# Altium footprint library PcbLib1.PcbLib: 18 footprints (part 1 of 2)
Each footprint in its own frame and in the unit in brackets; x right, y up, seen from the top. Pads: shape width x height; smd on the part's side, far side on the other; paste and mask are expansions set on the pad; w line width, h text height; cw(c..) or ccw(c..) is an arc to the next point about the centre after c.
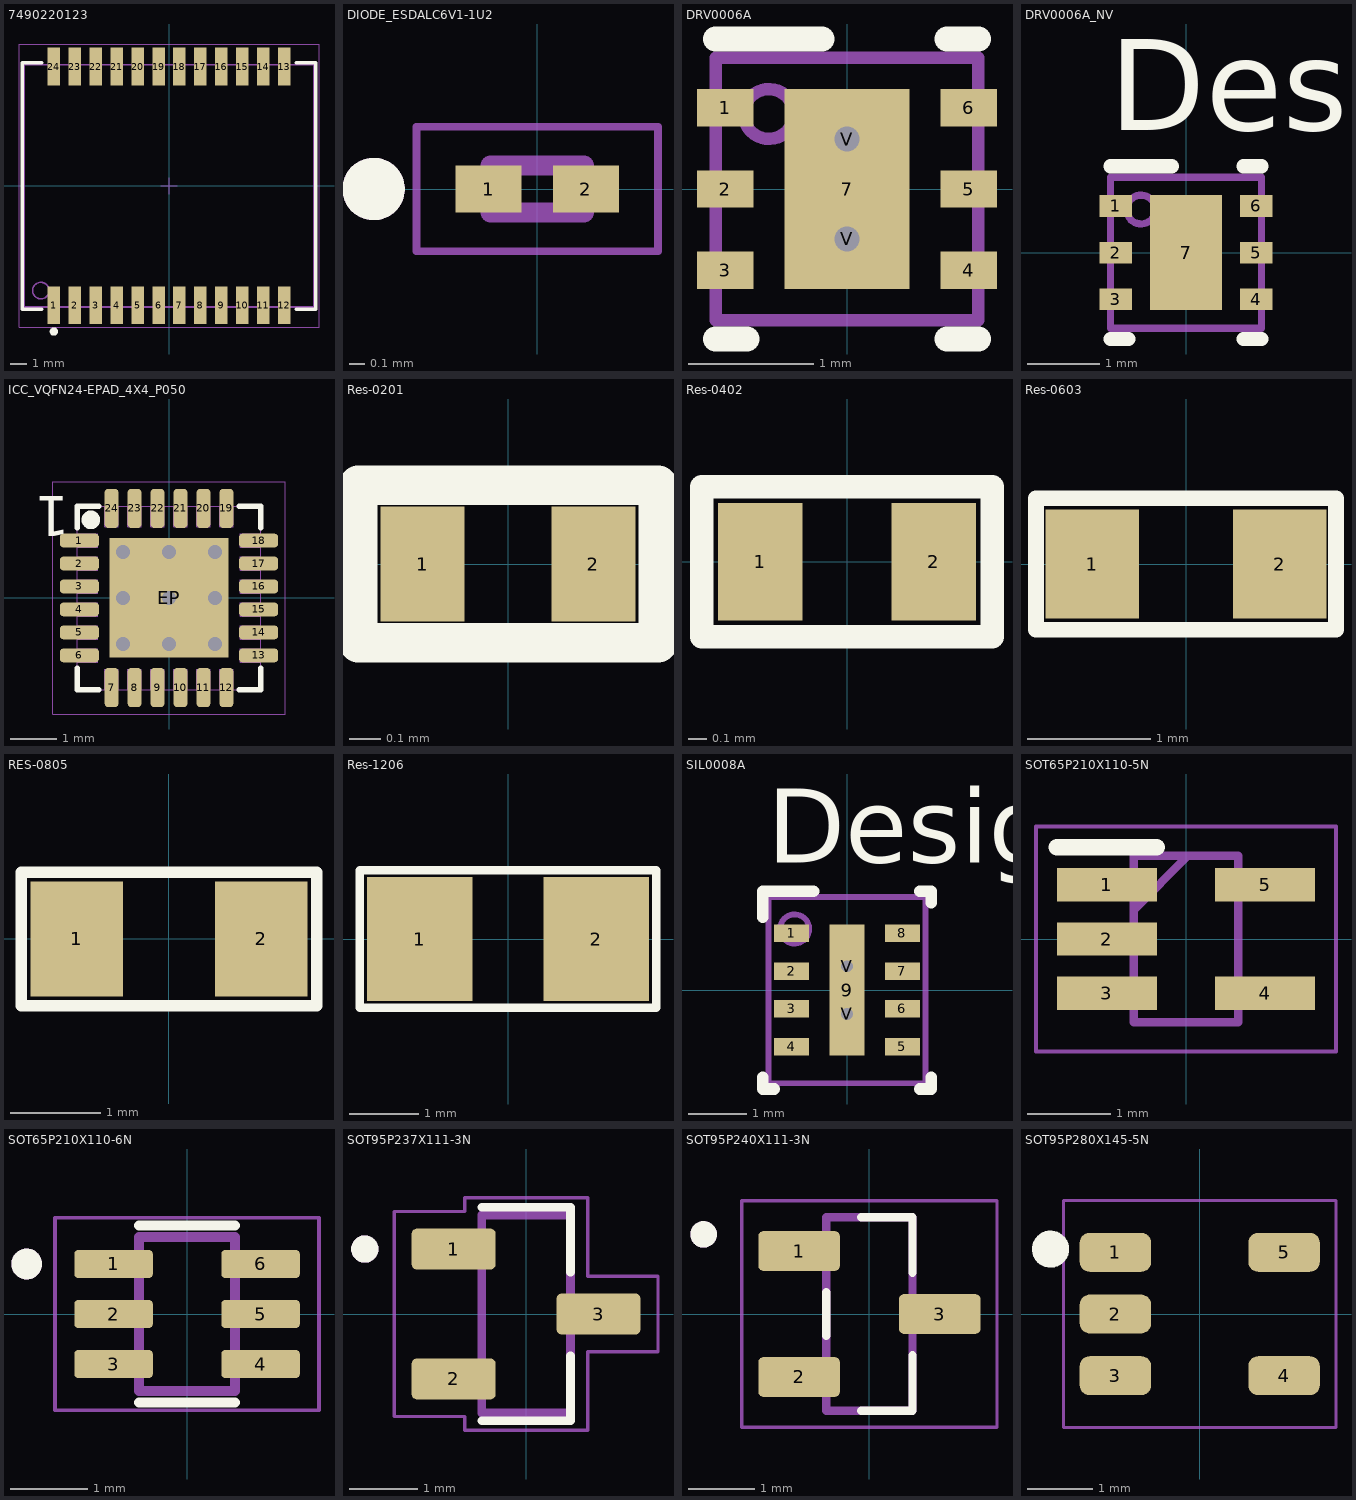
[diagram p0: the footprints below, top view; thin cyan lines are the x and y axes]

## 7490220123 [mm] "SMD LAN Transformers, body 18.04x14.7mm, 24-Leads"
height 9.05
pads (24):
  rect 0.76x2.29 smd: 1(-6.985,-7.24) 2(-5.715,-7.24) 3(-4.445,-7.24) 4(-3.175,-7.24) 5(-1.905,-7.24) 6(-0.635,-7.24) 7(0.635,-7.24) 8(1.905,-7.24) 9(3.175,-7.24) 10(4.445,-7.24) 11(5.715,-7.24) 12(6.985,-7.24) 13(6.985,7.24) 14(5.715,7.24) 15(4.445,7.24) 16(3.175,7.24) 17(1.905,7.24) 18(0.635,7.24) 19(-0.635,7.24) 20(-1.905,7.24) 21(-3.175,7.24) 22(-4.445,7.24) 23(-5.715,7.24) 24(-6.985,7.24)
Top Overlay:
  circle w0.25: c-6.985,-8.835 r0.125
  lines w0.2: -7.7,-7.475 -8.9,-7.475 -8.9,7.475 -7.7,7.475 ; 7.7,-7.475 8.9,-7.475 8.9,7.475 7.7,7.475
Top Courtyard:
  lines w0.05: -9.1,-8.585 9.1,-8.585 9.1,8.585 -9.1,8.585 -9.1,-8.585
Top Component Outline:
  circle w0.1: c-7.775,-6.35 r0.5
  lines w0.1: -8.775,-7.35 -8.775,7.35 8.775,7.35 8.775,-7.35 -8.775,-7.35
Top Component Center:
  lines w0.05: -0.5,0 0.5,0 ; 0,-0.5 0,0.5
Top Designator:
  text ".Designator" at -7.498,-0.5 h1.5
3D body "Download_STP_7490220123_rev1.stp": height 9.05, standoff 0, extent -9.145,-8 9.145,8

## DIODE_ESDALC6V1-1U2 [mm]
height 0.33
pads (2):
  rect 0.425x0.3 smd paste-1 mask+0.05: 1(-0.312,0) 2(0.312,0)
Top Overlay:
  circle w0.2: c-1.05,0 r0.1
Top Paste:
  region: -0.165,-0.112 -0.485,-0.112 -0.485,0.112 -0.165,0.112
  region: 0.485,-0.112 0.165,-0.112 0.165,0.112 0.485,0.112
Mechanical 13:
  circle w0.2: c-1.05,0 r0.1
  lines w0.127: -0.3,-0.15 0.3,-0.15 0.3,0.15 -0.3,0.15 -0.3,-0.15
Mechanical 15:
  lines w0.05: -0.775,-0.4 -0.775,0.4 0.775,0.4 0.775,-0.4 -0.775,-0.4
3D body "step_temp.STEP": height 0.33, standoff 0, extent -0.3,-0.15 0.3,0.15

## DRV0006A [mm]
pads (9):
  rect 0.45x0.3 smd paste-0.102 mask+0.051: 1(-0.975,0.65) 2(-0.975,0) 3(-0.975,-0.65) 4(0.975,-0.65) 5(0.975,0) 6(0.975,0.65)
  rect 1x1.6 smd paste-0.5 mask+0.051: 7(0,0)
  round 0.5 / inner round 1.524 / far side round 0.5 hole 0.203 paste-0.25 mask+0.051: V(0,-0.4) V(0,0.4)
Top Overlay:
  lines w0.2: -1.05,-1.2 -0.8,-1.2 ; -1.05,1.2 -0.2,1.2 ; 0.8,-1.2 1.05,-1.2 ; 0.8,1.2 1.05,1.2
Top Paste:
  region: -0.474,-0.733 0.475,-0.733 0.475,0.733 -0.474,0.733
Mechanical 13:
  circle w0.1: c-0.625,0.6 r0.2
  lines w0.1: -1.05,-1.05 -1.05,1.05 1.05,1.05 1.05,-1.05 -1.05,-1.05

## DRV0006A_NV [mm]
pads (7):
  rect 0.45x0.3 smd paste-0.102 mask+0.051: 1(-0.975,0.65) 2(-0.975,0) 3(-0.975,-0.65) 4(0.975,-0.65) 5(0.975,0) 6(0.975,0.65)
  rect 1x1.6 smd paste-0.5 mask+0.051: 7(0,0)
Top Overlay:
  lines w0.2: -1.05,-1.2 -0.8,-1.2 ; -1.05,1.2 -0.2,1.2 ; 0.8,-1.2 1.05,-1.2 ; 0.8,1.2 1.05,1.2
  text "Designator4" at -1.067,1.702 h1.27
Top Paste:
  region: -0.474,-0.733 0.475,-0.733 0.475,0.733 -0.474,0.733
Mechanical 13:
  circle w0.1: c-0.625,0.6 r0.2
  lines w0.1: -1.05,-1.05 1.05,-1.05 1.05,1.05 -1.05,1.05 -1.05,-1.05

## ICC_VQFN24-EPAD_4X4_P050 [mm]
pads (25):
  rrect50% 0.85x0.3 smd mask+0.05: 1(-1.95,1.25) 2(-1.95,0.75) 3(-1.95,0.25) 4(-1.95,-0.25) 5(-1.95,-0.75) 6(-1.95,-1.25) 13(1.95,-1.25) 14(1.95,-0.75) 15(1.95,-0.25) 16(1.95,0.25) 17(1.95,0.75) 18(1.95,1.25)
  rrect50% 0.3x0.85 smd mask+0.05: 7(-1.25,-1.95) 8(-0.75,-1.95) 9(-0.25,-1.95) 10(0.25,-1.95) 11(0.75,-1.95) 12(1.25,-1.95) 19(1.25,1.95) 20(0.75,1.95) 21(0.25,1.95) 22(-0.25,1.95) 23(-0.75,1.95) 24(-1.25,1.95)
  rect 2.6x2.6 smd paste-10 mask+0.05: EP(0,0)
via 0,0 diameter 0.6 hole 0.3
via -1,0 diameter 0.6 hole 0.3
via -1,1 diameter 0.6 hole 0.3
via 0,1 diameter 0.6 hole 0.3
via 1,1 diameter 0.6 hole 0.3
via 1,0 diameter 0.6 hole 0.3
via 1,-1 diameter 0.6 hole 0.3
via 0,-1 diameter 0.6 hole 0.3
via -1,-1 diameter 0.6 hole 0.3
Top Overlay:
  circle w0.254: c-1.7,1.7 r0.075
  lines w0.12: -2,-1.525 -2,-2 -1.525,-2 ; -2,1.525 -2,2 -1.525,2 ; 1.525,-2 2,-2 2,-1.525 ; 1.525,2 2,2 2,1.525
  text "1" at -2.159,2.504 h1.5
Top Paste:
  rectangle: -0.875,-0.875 -0.125,-0.125
  rectangle: 0.125,-0.875 0.875,-0.125
  rectangle: 0.125,0.125 0.875,0.875
  rectangle: -0.875,0.125 -0.125,0.875
Mechanical 14:
  lines w0.01: -2,-1.4 -1.55,-1.4 -1.55,-1.1 -2,-1.1 ; -2,-0.9 -1.55,-0.9 -1.55,-0.6 -2,-0.6 ; -2,-0.4 -1.55,-0.4 -1.55,-0.1 -2,-0.1 ; -2,0.1 -1.55,0.1 -1.55,0.4 -2,0.4 ; -2,0.6 -1.55,0.6 -1.55,0.9 -2,0.9 ; -2,1.1 -1.55,1.1 -1.55,1.4 -2,1.4 ; -1.4,-2 -1.4,-1.55 -1.1,-1.55 -1.1,-2 ; -1.4,2 -1.4,1.55 -1.1,1.55 -1.1,2 ; -0.9,-2 -0.9,-1.55 -0.6,-1.55 -0.6,-2 ; -0.9,2 -0.9,1.55 -0.6,1.55 -0.6,2 ; -0.4,-2 -0.4,-1.55 -0.1,-1.55 -0.1,-2 ; -0.4,2 -0.4,1.55 -0.1,1.55 -0.1,2 ; 0.1,-2 0.1,-1.55 0.4,-1.55 0.4,-2 ; 0.1,2 0.1,1.55 0.4,1.55 0.4,2 ; 0.6,-2 0.6,-1.55 0.9,-1.55 0.9,-2 ; 0.6,2 0.6,1.55 0.9,1.55 0.9,2 ; 1.1,-2 1.1,-1.55 1.4,-1.55 1.4,-2 ; 1.1,2 1.1,1.55 1.4,1.55 1.4,2 ; 2,-1.4 1.55,-1.4 1.55,-1.1 2,-1.1 ; 2,-0.9 1.55,-0.9 1.55,-0.6 2,-0.6 ; 2,-0.4 1.55,-0.4 1.55,-0.1 2,-0.1 ; 2,0.1 1.55,0.1 1.55,0.4 2,0.4 ; 2,0.6 1.55,0.6 1.55,0.9 2,0.9 ; 2,1.1 1.55,1.1 1.55,1.4 2,1.4 ; -2,-2 -2,2 2,2 2,-2 -2,-2 ; -1.25,-1.25 1.25,-1.25 1.25,1.25 -1.25,1.25 -1.25,-1.25
  text "'.Designator'" at -2,0.25 h0.75
  text "6" at -2.45,-1.125 h0.65
  text "24" at -1.575,2.05 h0.65
  text "19" at 0.975,2.05 h0.65
  text "18" at 2.45,0.975 h0.65
  text "13" at 2.45,-1.525 h0.65
  text "12" at 0.975,-2.45 h0.65
  text "7" at -1.4,-2.45 h0.65
  text "1" at -2.475,1.325 h0.65
  text "25" at -0.3,-0.225 h0.65
Mechanical 16:
  lines w0.01: -2.525,-2.525 2.525,-2.525 2.525,2.525 -2.525,2.525 -2.525,-2.525
3D body "VQFN24-EPAD.STEP": height 1.05, standoff -0.03, extent -2.05,-2.05 2.05,2.05
3D body: height 1.1, standoff 1, extent -1.448,1.051 -1.05,1.45
3D body: height 1, standoff 0, extent -2,-2 2,2

## Res-0201 [mm]
pads (2):
  rect 0.27x0.37 smd mask+0.055: 1(-0.275,0) 2(0.275,0)
Top Overlay:
  lines w0.127: -0.483,-0.254 -0.483,0.254 0.483,0.254 0.483,-0.254 -0.483,-0.254
3D body "User Library-0201(0603M) Res.step": height 0.29, standoff -0.02, extent -0.305,-0.152 0.305,0.153

## Res-0402 [mil]
pads (2):
  rect 18x25 smd mask+2.17: 1(-18.5,0) 2(18.5,0)
Top Overlay:
  lines w0.13: -32,-17 32,-17
  lines w5: -31,-16 31,-16 31,16 -31,16 -31,-16
3D body "User Library-RES_1005-0402.step": height 16.14, standoff 0, extent -22.63,-10.82 22.64,10.83

## Res-0603 [mil]
pads (2):
  rect 30x35 smd: 1(-30,0) 2(30,0)
Top Overlay:
  lines w5: -48,-21 -48,21 48,21 48,-21 -48,-21
3D body "User Library-RESC1608X05N.step": height 17.76, standoff 0, extent -30.52,-16.74 30.51,16.73

## RES-0805 [mil] "SMD 0805"
pads (2):
  rect 40x50 smd: 1(-40,0) 2(40,0)
Top Overlay:
  lines w5: -64,-29 -64,29 64,29 64,-29 -64,-29
3D body "User Library-CR2012-0805.STEP": height 23.62, standoff 0, extent -39.34,-24.75 39.4,24.46

## Res-1206 [mil]
pads (2):
  rect 60x70 smd: 1(-50,0) 2(50,0)
Top Overlay:
  lines w5: -84,-39 84,-39 84,39 -84,39 -84,-39
3D body "User Library-CR3216-1206.step": height 23.62, standoff 0, extent -62.99,-31.5 62.99,31.5

## SIL0008A [mm]
pads (11):
  rect 0.6x0.3 smd paste+0 mask+0: 1(-0.95,0.975) 2(-0.95,0.325) 3(-0.95,-0.325) 4(-0.95,-0.975) 5(0.95,-0.975) 6(0.95,-0.325) 7(0.95,0.325) 8(0.95,0.975)
  rect 0.6x2.25 smd paste-1.112 mask+0: 9(0,0)
  round 0.381 / inner round 1.524 / far side round 0.381 hole 0.203 paste-0.191 mask+0.051: V(0,-0.41) V(0,0.41)
Top Overlay:
  lines w0.2: -1.45,-1.5 -1.45,-1.7 -1.25,-1.7 ; -1.45,1.25 -1.45,1.7 -0.575,1.7 ; 1.25,-1.7 1.45,-1.7 1.45,-1.5 ; 1.25,1.7 1.45,1.7 1.45,1.5
  text "Designator9" at -1.372,2.184 h1.27
Top Paste:
  region: -0.3,-0.508 -0.3,-1.125 0.3,-1.125 0.3,-0.508
  region: -0.3,1.125 -0.3,0.508 0.3,0.508 0.3,1.125
  region: -0.3,0.308 -0.3,-0.308 0.3,-0.308 0.3,0.308
Mechanical 13:
  circle w0.1: c-0.9,1.05 r0.25
  lines w0.1: -1.35,-1.6 -1.35,1.6 1.35,1.6 1.35,-1.6 -1.35,-1.6

## SOT65P210X110-5N [mm]
pads (5):
  rect 1.2x0.4 smd: 1(-0.95,0.65) 2(-0.95,0) 3(-0.95,-0.65) 4(0.95,-0.65) 5(0.95,0.65)
Top Overlay:
  lines w0.2: -1.55,1.1 -0.35,1.1
Mechanical 13:
  lines w0.05: -1.8,-1.35 1.8,-1.35 1.8,1.35 -1.8,1.35 -1.8,-1.35
  lines w0.1: -0.625,0.35 0.025,1 ; -0.625,-1 0.625,-1 0.625,1 -0.625,1 -0.625,-1
3D body "step_temp.STEP": height 1.1, standoff 0, extent -1.05,-1 1.05,1

## SOT65P210X110-6N [mm]
pads (6):
  rrect25% 1.02x0.36 smd: 1(-0.955,0.65) 2(-0.955,0) 3(-0.955,-0.65) 4(0.955,-0.65) 5(0.955,0) 6(0.955,0.65)
Top Overlay:
  circle w0.2: c-2.083,0.65 r0.1
  lines w0.127: -0.625,-1.15 0.625,-1.15 ; -0.625,1.15 0.625,1.15
Mechanical 13:
  circle w0.2: c-2.083,0.65 r0.1
  lines w0.127: -0.625,-1 0.625,-1 0.625,1 -0.625,1 -0.625,-1
Mechanical 15:
  lines w0.05: -1.715,-1.25 1.715,-1.25 1.715,1.25 -1.715,1.25 -1.715,-1.25

## SOT95P237X111-3N [mm]
pads (3):
  rrect25% 1.23x0.6 smd: 1(-1.06,0.95) 2(-1.06,-0.95) 3(1.06,0)
Top Overlay:
  circle w0.2: c-2.36,0.95 r0.1
  lines w0.127: -0.65,-1.564 0.65,-1.564 0.65,-0.614 ; -0.65,1.564 0.65,1.564 0.65,0.614
Mechanical 13:
  circle w0.2: c-2.36,0.95 r0.1
  lines w0.127: -0.65,-1.45 -0.65,1.45 0.65,1.45 0.65,-1.45 -0.65,-1.45
Mechanical 15:
  lines w0.05: -1.93,-1.5 -0.9,-1.5 -0.9,-1.7 0.9,-1.7 0.9,-0.55 1.93,-0.55 1.93,0.55 0.9,0.55 0.9,1.7 -0.9,1.7 -0.9,1.5 -1.93,1.5 -1.93,-1.5

## SOT95P240X111-3N [mm]
height 1.11
pads (3):
  rrect25% 1.23x0.6 smd: 1(-1.06,0.95) 2(-1.06,-0.95) 3(1.06,0)
Top Overlay:
  circle w0.2: c-2.5,1.2 r0.1
  lines w0.127: -0.65,-0.33 -0.65,0.33 ; -0.125,-1.46 0.65,-1.46 0.65,-0.62 ; -0.125,1.46 0.65,1.46 0.65,0.62
Mechanical 13:
  circle w0.2: c-2.5,1.2 r0.1
  lines w0.127: -0.65,-1.46 0.65,-1.46 0.65,1.46 -0.65,1.46 -0.65,-1.46
Mechanical 15:
  lines w0.05: -1.925,-1.71 -1.925,1.71 1.925,1.71 1.925,-1.71 -1.925,-1.71
3D body "step_temp.STEP": height 1.11, standoff 0, extent -1.2,-1.45 1.2,1.45

## SOT95P280X145-5N [mm]
pads (5):
  rrect50% 1.1x0.6 smd: 1(-1.3,0.95) 2(-1.3,0) 3(-1.3,-0.95) 4(1.3,-0.95) 5(1.3,0.95)
Top Overlay:
  circle w0.127: c-2.3,1 r0.224
  circle w0.127: c-2.3,1 r0.141
  circle w0.127: c-2.3,1 r0.1
  circle w0.127: c-2.4,1 r0.1
Mechanical 15:
  lines w0.05: -2.1,-1.75 2.1,-1.75 2.1,1.75 -2.1,1.75 -2.1,-1.75
3D body "step_temp.STEP": height 1.45, standoff 0, extent -1.4,-1.45 1.4,1.45